# Altium footprint library PTMA401120N2AS.PcbLib: 1 footprints
Each footprint in its own frame and in the unit in brackets; x right, y up, seen from the top. Pads: shape width x height; smd on the part's side, far side on the other; paste and mask are expansions set on the pad; w line width, h text height; cw(c..) or ccw(c..) is an arc to the next point about the centre after c.
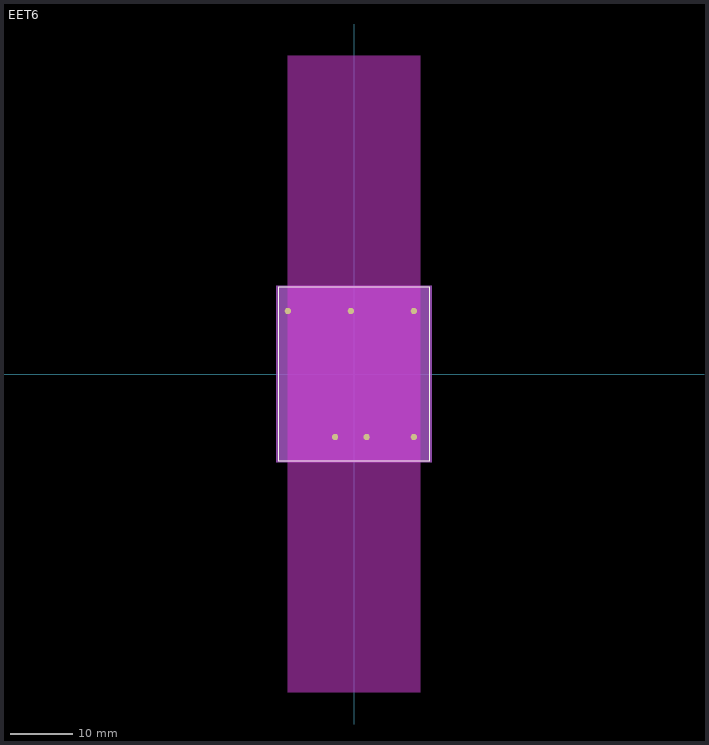
[diagram p0: the footprint, top view; thin cyan lines are the x and y axes]

## EET6 [mil]
pads (6):
  round 40 smd paste-20 mask-20: 1(-120,-400) 2(80,-400) 3(380,-400) 4(-420,400) 5(-20,400) 6(380,400)
Top Overlay:
  lines w6: -480,-550 480,-550 480,550 -480,550 -480,-550
  text ".Designator" at -137.5,-25 h50
Keep-Out Layer:
  region: -420,-2020 -420,2020 420,2020 420,-2020
Mechanical 13:
  lines w1: -480,-550 480,-550 480,550 -480,550 -480,-550
  text ".Designator" at -137.5,-25 h50
Mechanical 15:
  region: 490,-560 -490,-560 -490,560 490,560
  lines w6: -490,-560 -490,560 490,560 490,-560 -490,-560